# Altium footprint library LQH32MN220J23L.PcbLib: 2 footprints
Each footprint in its own frame and in the unit in brackets; x right, y up, seen from the top. Pads: shape width x height; smd on the part's side, far side on the other; paste and mask are expansions set on the pad; w line width, h text height; cw(c..) or ccw(c..) is an arc to the next point about the centre after c.
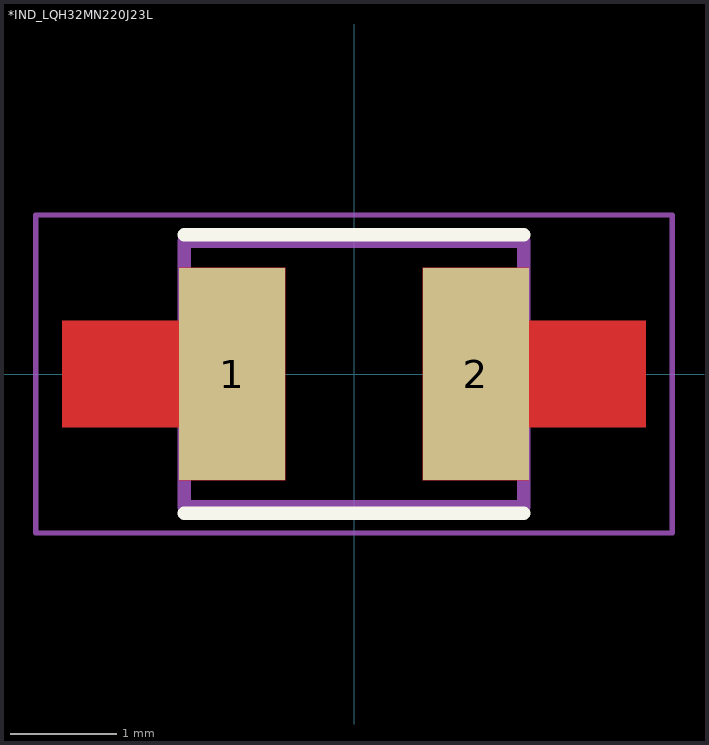
[diagram p0: the footprints below, top view; thin cyan lines are the x and y axes]

## *IND_LQH32MN220J23L [mm]
pads (2):
  rect 1x2 smd: 1(-1.15,0) 2(1.15,0)
Top Layer:
  region: 1.65,-1 0.65,-1 0.65,1 1.65,1 1.65,0.5 2.75,0.5 2.75,-0.5 1.65,-0.5
  region: -1.65,1 -0.65,1 -0.65,-1 -1.65,-1 -1.65,-0.5 -2.75,-0.5 -2.75,0.5 -1.65,0.5
Top Overlay:
  lines w0.127: -1.6,-1.314 1.6,-1.314 ; -1.6,1.314 1.6,1.314
Top Paste:
  region: 1.65,-1 0.65,-1 0.65,1 1.65,1 1.65,0.5 2.75,0.5 2.75,-0.5 1.65,-0.5
  region: -1.65,1 -0.65,1 -0.65,-1 -1.65,-1 -1.65,-0.5 -2.75,-0.5 -2.75,0.5 -1.65,0.5
Top Solder:
  region: 0.55,1.1 1.75,1.1 1.75,0.6 2.85,0.6 2.85,-0.6 1.75,-0.6 1.75,-1.1 0.55,-1.1
  region: -2.85,0.6 -1.75,0.6 -1.75,1.1 -0.55,1.1 -0.55,-1.1 -1.75,-1.1 -1.75,-0.6 -2.85,-0.6
Mechanical 4:
  lines w0.127: -1.6,-1.25 -1.6,1.25 ; -1.6,-1.25 1.6,-1.25 ; -1.6,-1.25 -1.6,1.25 ; -1.6,-1.25 1.6,-1.25 ; -1.6,1.25 1.6,1.25 ; -1.6,1.25 1.6,1.25 ; 1.6,-1.25 1.6,1.25 ; 1.6,-1.25 1.6,1.25
Mechanical 16:
  lines w0.05: -3,-1.5 -3,1.5 3,1.5 3,-1.5 -3,-1.5

## PCBComponent_1 [mm]